# Altium footprint library W5500-EVB-Pico2_V100.PcbLib: 30 footprints (part 1 of 2)
Each footprint in its own frame and in the unit in brackets; x right, y up, seen from the top. Pads: shape width x height; smd on the part's side, far side on the other; paste and mask are expansions set on the pad; w line width, h text height; cw(c..) or ccw(c..) is an arc to the next point about the centre after c.
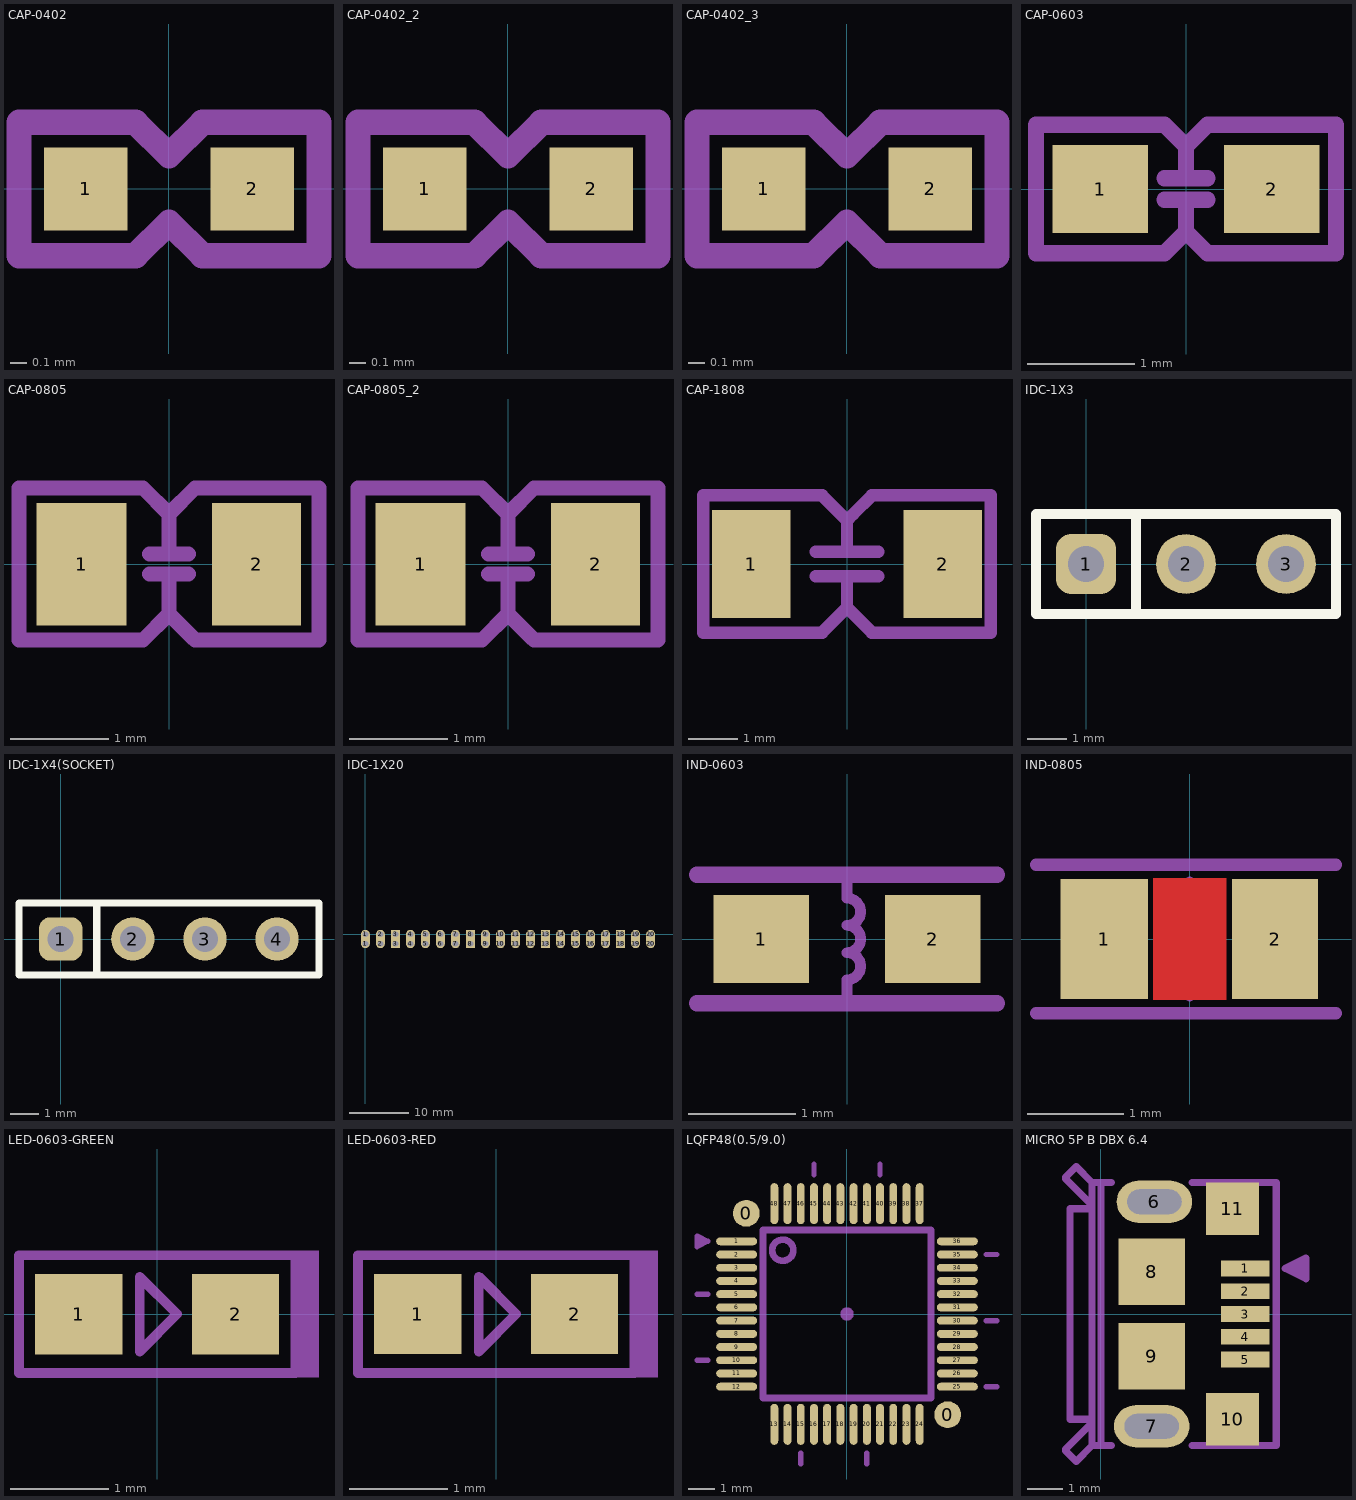
[diagram p0: the footprints below, top view; thin cyan lines are the x and y axes]

## CAP-0402 [mm]
pads (2):
  rect 0.5x0.5 smd: 1(-0.5,0) 2(0.5,0)
Mechanical 3:
  lines w0.152: -0.9,-0.4 -0.2,-0.4 0,-0.2 0.2,-0.4 0.9,-0.4 0.9,0.4 0.2,0.4 0,0.2 -0.2,0.4 -0.9,0.4 -0.9,-0.4
3D body "CAPC1005X06.STEP": height 0.6, standoff 0, extent -0.483,-0.254 0.517,0.246

## CAP-0402_2 [mm]
pads (2):
  rect 0.5x0.5 smd: 1(-0.5,0) 2(0.5,0)
Mechanical 3:
  lines w0.152: -0.9,-0.4 -0.2,-0.4 0,-0.2 0.2,-0.4 0.9,-0.4 0.9,0.4 0.2,0.4 0,0.2 -0.2,0.4 -0.9,0.4 -0.9,-0.4
3D body "CAPC1005X06.STEP": height 0.6, standoff 0, extent -0.483,-0.254 0.517,0.246

## CAP-0402_3 [mm]
pads (2):
  rect 0.5x0.5 smd: 1(-0.5,0) 2(0.5,0)
Mechanical 3:
  lines w0.152: -0.9,-0.4 -0.9,0.4 -0.2,0.4 0,0.2 0.2,0.4 0.9,0.4 0.9,-0.4 0.2,-0.4 0,-0.2 -0.2,-0.4 -0.9,-0.4
3D body "CAPC1005X06.STEP": height 0.6, standoff 0, extent -0.483,-0.254 0.517,0.246

## CAP-0603 [mm] "Ceramic CAP 0603(1608)"
height 1
pads (2):
  rect 0.89x0.82 smd: 1(-0.8,0) 2(0.8,0)
Mechanical 3:
  lines w0.152: -0.2,-0.1 0.2,-0.1 ; -0.2,0.1 0.2,0.1 ; 0,-0.1 0,-0.4 ; 0,0.1 0,0.4 ; 0,-0.4 0.2,-0.6 1.4,-0.6 1.4,0.6 0.2,0.6 0,0.4 ; 0,-0.4 -0.2,-0.6 -1.4,-0.6 -1.4,0.6 -0.2,0.6 0,0.4
3D body "User Library-CerCaps0603.STEP": height 0.81, standoff -0.01, extent -0.927,-0.412 0.927,0.413

## CAP-0805 [mil]
pads (2):
  rect 36x49 smd: 1(-35,0)
  rect 35.43x49 smd: 2(35,0)
Mechanical 3:
  lines w6: -7.87,-3.94 7.87,-3.94 ; -7.87,3.94 7.87,3.94 ; 0,-3.94 0,-20 ; 0,3.94 0,20 ; 0,-20 10,-30 10.45,-30.45 60,-30.45 60,30.45 10.45,30.45 0,20 ; 0,-20 -10.45,-30.45 -60,-30.45 -60,30.45 -10.45,30.45 0,20
3D body "0805 SMD Capacitor.STEP": height 30.79, standoff 0, extent -39.24,-24.5 39.5,24.71

## CAP-0805_2 [mil]
pads (2):
  rect 36x49 smd: 1(-35,0)
  rect 35.43x49 smd: 2(35,0)
Mechanical 3:
  lines w6: -7.87,-3.94 7.87,-3.94 ; -7.87,3.94 7.87,3.94 ; 0,-3.94 0,-20 ; 0,3.94 0,20 ; 0,-20 10,-30 10.45,-30.45 60,-30.45 60,30.45 10.45,30.45 0,20 ; 0,-20 -10.45,-30.45 -60,-30.45 -60,30.45 -10.45,30.45 0,20
3D body "0805 SMD Capacitor.STEP": height 30.79, standoff 0, extent -39.24,-24.5 39.5,24.71

## CAP-1808 [mm] "Ceramic CAP 1808(4520)"
height 4.35
pads (2):
  rect 1.6x2.2 smd: 1(-1.95,0) 2(1.95,0)
Mechanical 3:
  lines w0.254: -0.635,-0.254 0.635,-0.254 ; -0.635,0.254 0.635,0.254 ; 0,-0.254 0,-0.889 ; 0,0.254 0,0.889 ; 0,-0.889 -0.508,-1.397 -2.921,-1.397 -2.921,1.397 -0.508,1.397 0,0.889 ; 0,-0.889 0.508,-1.397 2.921,-1.397 2.921,1.397 0.508,1.397 0.127,1.016 0,0.889
3D body "User Library-Chip Cap_MLCC_1808 (4520)_K.STEP": height 2, standoff 0, extent -2.25,-1.016 2.25,1.014

## IDC-1X3 [mil]
height 171.26
pads (3):
  rrect50% 60x60 hole 36: 1(0,0)
  round 60 hole 36: 2(100,0) 3(200,0)
Top Overlay:
  lines w10: 50,-50 50,50 ; -50,-50 250,-50 250,50 -50,50 -50,-50
3D body "PH03-3.STEP": height 336.22, standoff -118.11, extent -49.21,-49.21 250.79,50.79

## IDC-1X4(SOCKET) [mil]
pads (4):
  rrect50% 60x60 hole 36: 1(0,0)
  round 60 hole 36: 2(100,0) 3(200,0) 4(300,0)
Top Overlay:
  lines w10: 50,-50 50,50 ; -57.87,-50 -57.87,50 358.27,50 358.27,-50 -57.87,-50
3D body "M20-7820442.stp": height 340.55, standoff -127.95, extent -57.87,-49.21 357.87,49.21

## IDC-1X20 [mm]
pads (40):
  oval 1.5x2.5 hole 1 copper offset 0,0.5: 1(0,-1.61) 2(2.54,-1.61) 4(7.62,-1.61) 5(10.16,-1.61) 6(12.7,-1.61) 7(15.24,-1.61) 9(20.32,-1.61) 10(22.86,-1.61) 11(25.4,-1.61) 12(27.94,-1.61) 14(33.02,-1.61) 15(35.56,-1.61) 16(38.1,-1.61) 17(40.64,-1.61) 19(45.72,-1.61) 20(48.26,-1.61)
  oval 1.5x2.5 hole 1 copper offset 0,-0.5: 1(0,0) 2(2.54,0) 4(7.62,0) 5(10.16,0) 6(12.7,0) 7(15.24,0) 9(20.32,0) 10(22.86,0) 11(25.4,0) 12(27.94,0) 14(33.02,0) 15(35.56,0) 16(38.1,0) 17(40.64,0) 19(45.72,0) 20(48.26,0)
  rect 1.5x2.5 hole 1 copper offset 0,0.5: 3(5.08,-1.61) 8(17.78,-1.61) 13(30.48,-1.61) 18(43.18,-1.61)
  rect 1.5x2.5 hole 1 copper offset 0,-0.5: 3(5.08,0) 8(17.78,0) 13(30.48,0) 18(43.18,0)

## IND-0603 [mm] "Inductor 0603(1608)"
height 4.35
pads (2):
  rect 0.89x0.82 smd: 1(-0.8,0) 2(0.8,0)
Mechanical 3:
  lines w0.1: 0,-0.6 0,-0.381 ccw(c0,-0.254) 0,-0.127 ccw(c0,0) 0,0.127 ccw(c0,0.254) 0,0.381 0,0.6
  lines w0.152: -1.4,-0.6 1.4,-0.6 ; -1.4,0.6 1.4,0.6
3D body "User Library-Chip InductorINDC1608X95N.STEP": height 0.95, standoff 0, extent -0.8,-0.4 0.8,0.4

## IND-0805 [mil]
height 43.31
pads (2):
  rect 36x49 smd: 1(-35,0)
  rect 35.43x49 smd: 2(35,0)
Top Layer:
  pour cut-out: -15,25 -15,-25 15,-25 15,25
Mechanical 3:
  lines w3.94: 0,-23.62 0,-15 ccw(c0,-10) 0,-5 ccw(c0,0) 0,5 ccw(c0,10) 0,15 0,23.62
  lines w5: -63,-30.45 60,-30.45 ; -63,30.45 60,30.45
3D body "User Library-ind_0805.STEP": height 37.4, standoff 0, extent -39.37,-23.62 39.37,23.62

## LED-0603-GREEN [mm] "LED-0603-GREEN"
height 4.35
pads (2):
  rect 0.89x0.82 smd: 1(-0.8,0) 2(0.8,0)
Mechanical 3:
  rectangle: 1.41,-0.649 1.651,0.651
  lines w0.1: -1.41,-0.6 -1.41,0.6 1.41,0.6 1.41,-0.6 -1.41,-0.6 ; -0.178,-0.381 -0.178,0.381 0.203,0 -0.178,-0.381
3D body "LED-0603-GREEN.STEP": height 0.9, standoff 0, extent -0.85,-0.45 0.85,0.45

## LED-0603-RED [mm] "LED-0603-RED"
height 1
pads (2):
  rect 0.89x0.82 smd: 1(-0.8,0) 2(0.8,0)
Mechanical 3:
  rectangle: 1.41,-0.65 1.651,0.65
  lines w0.1: -1.41,-0.6 1.41,-0.6 1.41,0.6 -1.41,0.6 -1.41,-0.6 ; -0.178,-0.381 0.203,0 -0.178,0.381 -0.178,-0.381
3D body "LED-0603-RED.STEP": height 0.9, standoff 0, extent -0.85,-0.45 0.85,0.45

## LQFP48(0.5/9.0) [mm]
pads (50):
  round 1.016 smd: 0(-3.81,3.81) 0(3.81,-3.81)
  oval 1.55x0.3 smd: 1(-4.175,2.75) 2(-4.175,2.25) 3(-4.175,1.75) 4(-4.175,1.25) 5(-4.175,0.75) 6(-4.175,0.25) 7(-4.175,-0.25) 8(-4.175,-0.75) 9(-4.175,-1.25) 10(-4.175,-1.75) 11(-4.175,-2.25) 12(-4.175,-2.75) 25(4.175,-2.75) 26(4.175,-2.25) 27(4.175,-1.75) 28(4.175,-1.25) 29(4.175,-0.75) 30(4.175,-0.25) 31(4.175,0.25) 32(4.175,0.75) 33(4.175,1.25) 34(4.175,1.75) 35(4.175,2.25) 36(4.175,2.75)
  oval 0.3x1.55 smd: 13(-2.75,-4.175) 14(-2.25,-4.175) 15(-1.75,-4.175) 16(-1.25,-4.175) 17(-0.75,-4.175) 18(-0.25,-4.175) 19(0.25,-4.175) 20(0.75,-4.175) 21(1.25,-4.175) 22(1.75,-4.175) 23(2.25,-4.175) 24(2.75,-4.175) 37(2.75,4.175) 38(2.25,4.175) 39(1.75,4.175) 40(1.25,4.175) 41(0.75,4.175) 42(0.25,4.175) 43(-0.25,4.175) 44(-0.75,4.175) 45(-1.25,4.175) 46(-1.75,4.175) 47(-2.25,4.175) 48(-2.75,4.175)
Mechanical 3:
  circle w0.254: c-2.432,2.413 r0.4
  circle w0.254: c0,0 r0.127
  lines w0.203: -5.675,-1.75 -5.275,-1.75 ; -5.675,0.75 -5.275,0.75 ; -5.675,2.75 -5.275,2.75 ; -1.75,-5.675 -1.75,-5.275 ; -1.25,5.275 -1.25,5.675 ; 0.75,-5.675 0.75,-5.275 ; 1.25,5.275 1.25,5.675 ; 5.275,-2.75 5.675,-2.75 ; 5.275,-0.25 5.675,-0.25 ; 5.275,2.25 5.675,2.25 ; -5.275,2.75 -5.675,2.55 -5.675,2.95 -5.275,2.75
  lines w0.254: -3.175,-3.175 -3.175,3.175 3.175,3.175 3.175,-3.175 -3.175,-3.175
3D body "User Library-lqfp48-1.STEP": height 1.5, standoff 0.02, extent -4.5,-4.5 4.5,4.5

## MICRO 5P B DBX 6.4 [mm]
height 4.35
pads (11):
  rect 1.38x0.45 smd: 1(4.11,1.3) 2(4.11,0.65) 3(4.11,0) 4(4.11,-0.65) 5(4.11,-1.3)
  oval 2.15x1.2 hole 0.7 slot 1.55 at 0 deg: 6(1.524,3.2) 7(1.45,-3.2)
  rect 1.9x1.9 smd: 8(1.45,1.2) 9(1.45,-1.2)
  rect 1.5x1.5 smd: 10(3.75,-3) 11(3.75,3)
Mechanical 3:
  region: 5.253,1.3 5.853,1 5.853,1.6
  lines w0.2: 5.253,1.3 5.853,1 5.853,1.6 5.253,1.3
  lines w0.203: -0.25,-3.1 -1,-3.85 -1,-3.9 -0.7,-4.2 -0.25,-3.75 ; -0.25,-3 -0.88,-3 -0.88,3 -0.25,3 ; -0.25,3.1 -1,3.85 -1,3.9 -0.7,4.2 -0.25,3.75 ; 0.3,-3.75 0,-3.75 ; 0.3,3.75 0,3.75 ; 2.6,-3.75 5,-3.75 5,3.75 2.6,3.75 ; -0.25,-3.75 -0.25,-3.75 ; -0.25,-3.75 0,-3.75 ; -0.25,-3.75 -0.25,3.75 ; -0.25,3.75 -0.25,3.75 ; -0.25,3.75 0,3.75 ; 0,-3.75 0,3.75
3D body "User Library-MicroUSB-B_Molex_105017-0001.STEP": height 2.68, standoff -0.63, extent -0.88,-4.1 4.55,4.1